# Altium footprint library Terminal_Blocks_Pluggable PCB_5.08mm.PcbLib: 299 footprints (part 5 of 19)
Each footprint in its own frame and in the unit in brackets; x right, y up, seen from the top. Pads: shape width x height; smd on the part's side, far side on the other; paste and mask are expansions set on the pad; w line width, h text height; cw(c..) or ccw(c..) is an arc to the next point about the centre after c.
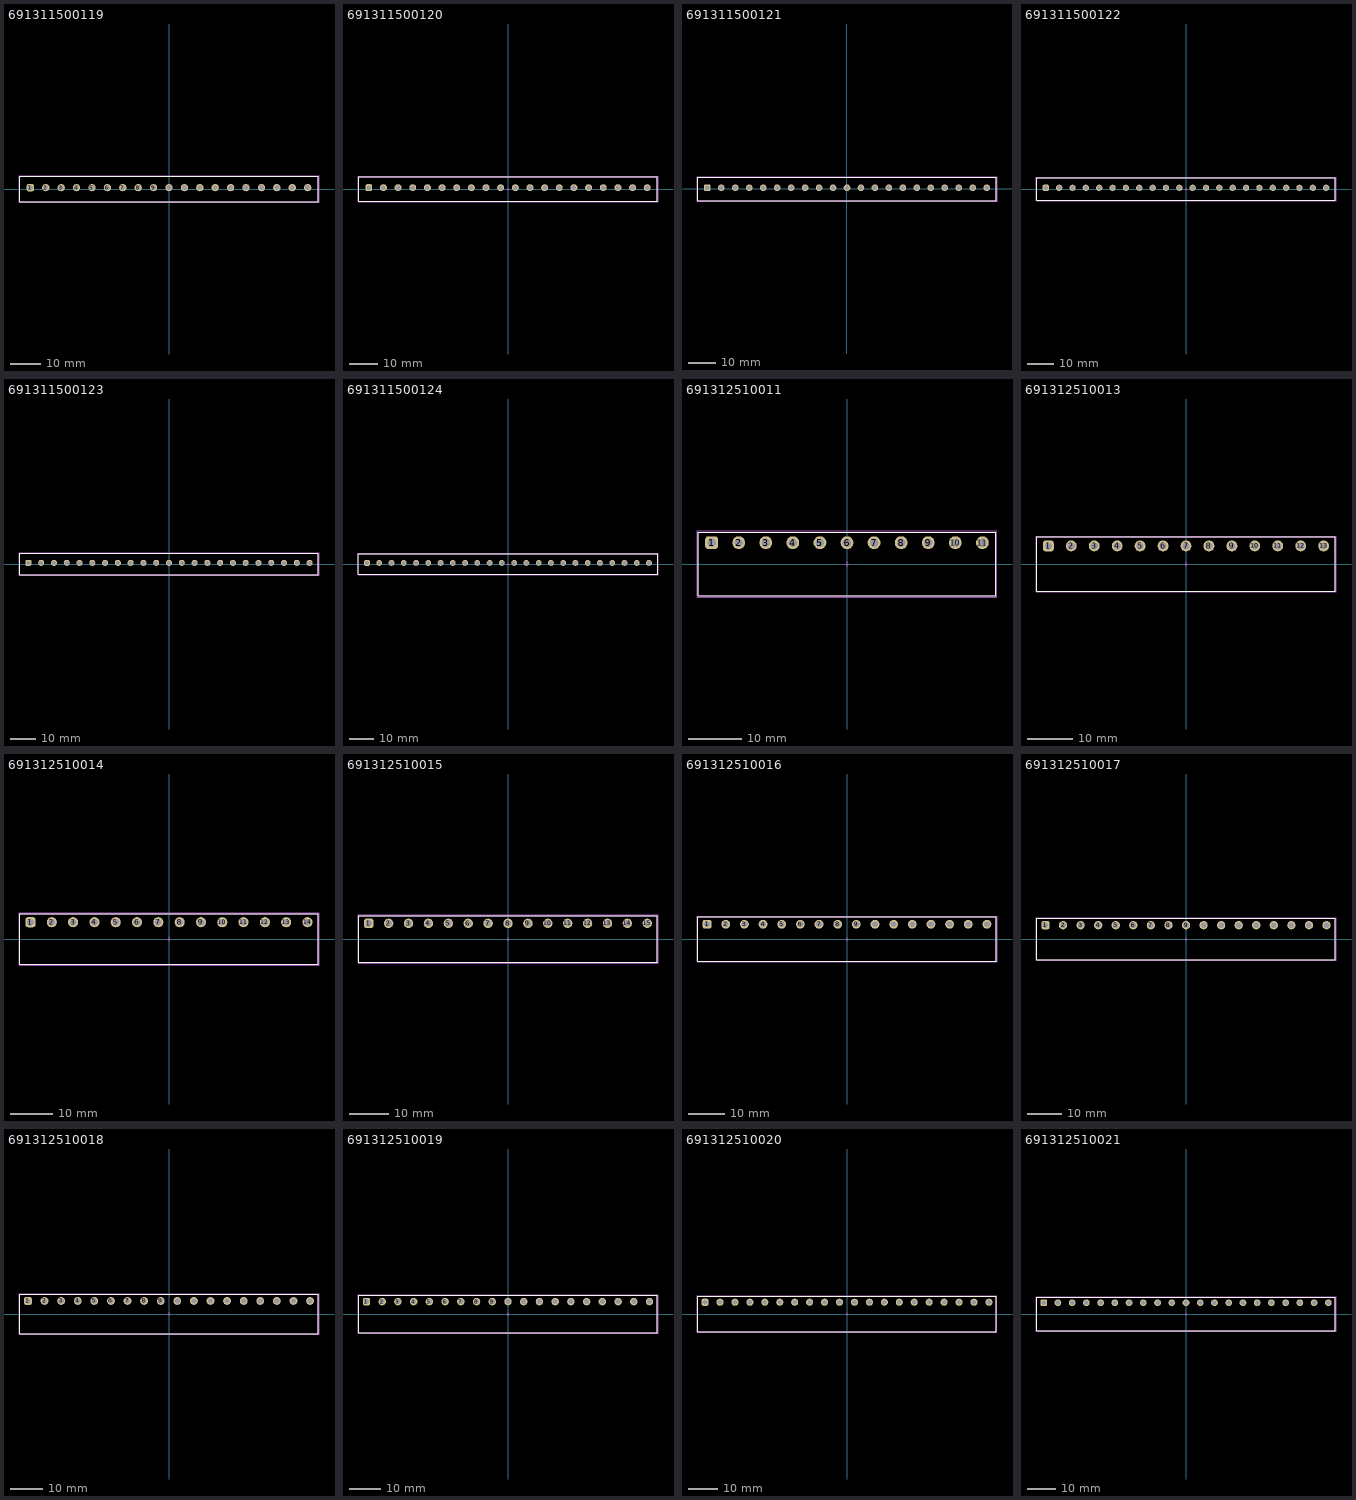
[diagram p4: the footprints below, top view; thin cyan lines are the x and y axes]

## 691311500119 [mm] "5,08mm - PCB Headers - Vertical - Closed ends -19p"
height 12
pads (19):
  rrect50% 2.4x2.4 hole 1.6: 1(-45.72,0.45)
  round 2.4 hole 1.6: 2(-40.64,0.45) 3(-35.56,0.45) 4(-30.48,0.45) 5(-25.4,0.45) 6(-20.32,0.45) 7(-15.24,0.45) 8(-10.16,0.45) 9(-5.08,0.45) 10(0,0.45) 11(5.08,0.45) 12(10.16,0.45) 13(15.24,0.45) 14(20.32,0.45) 15(25.4,0.45) 16(30.48,0.45) 17(35.56,0.45) 18(40.64,0.45) 19(45.72,0.45)
Top Overlay:
  lines w0.2: -49.26,-4.25 49.26,-4.25 49.26,4.25 -49.26,4.25 -49.26,-4.25
Top Designator:
  text ".Designator" at -7.498,-0.5 h1.5
Top Component Outline:
  lines w0.1: -49.26,-4.25 -49.26,4.25 49.26,4.25 49.26,-4.25 -49.26,-4.25
Top 3D Body:
  lines w0.1: -49.26,-4.25 49.26,-4.25 49.26,4.25 -49.26,4.25 -49.26,-4.25
Top Courtyard:
  lines w0.05: -49.46,-4.45 49.46,-4.45 49.46,4.45 -49.46,4.45 -49.46,-4.45
Top Component Center:
  lines w0.05: -0.5,0 0.5,0 ; 0,-0.5 0,0.5
3D body "691311500119.stp": height 12.05, standoff -3.95, extent -49.26,-4.25 49.26,4.25

## 691311500120 [mm] "5,08mm - PCB Headers - Vertical - Closed ends -20p"
height 12
pads (20):
  rrect50% 2.4x2.4 hole 1.6: 1(-48.26,0.45)
  round 2.4 hole 1.6: 2(-43.18,0.45) 3(-38.1,0.45) 4(-33.02,0.45) 5(-27.94,0.45) 6(-22.86,0.45) 7(-17.78,0.45) 8(-12.7,0.45) 9(-7.62,0.45) 10(-2.54,0.45) 11(2.54,0.45) 12(7.62,0.45) 13(12.7,0.45) 14(17.78,0.45) 15(22.86,0.45) 16(27.94,0.45) 17(33.02,0.45) 18(38.1,0.45) 19(43.18,0.45) 20(48.26,0.45)
Top Overlay:
  lines w0.2: -51.8,-4.25 -51.8,4.25 51.8,4.25 51.8,-4.25 -51.8,-4.25
Top Designator:
  text ".Designator" at -7.498,-0.5 h1.5
Top Component Outline:
  lines w0.1: -51.8,-4.25 51.8,-4.25 51.8,4.25 -51.8,4.25 -51.8,-4.25
Top 3D Body:
  lines w0.1: -51.8,-4.25 -51.8,4.25 51.8,4.25 51.8,-4.25 -51.8,-4.25
Top Courtyard:
  lines w0.05: -52,-4.45 -52,4.45 52,4.45 52,-4.45 -52,-4.45
Top Component Center:
  lines w0.05: -0.5,0 0.5,0 ; 0,-0.5 0,0.5
3D body "691311500120.stp": height 12.05, standoff -3.95, extent -51.8,-4.25 51.8,4.25

## 691311500121 [mm] "5,08mm - PCB Headers - Vertical - Closed ends -21p"
height 12
pads (21):
  rrect50% 2.4x2.4 hole 1.6: 1(-50.8,0.45)
  round 2.4 hole 1.6: 2(-45.72,0.45) 3(-40.64,0.45) 4(-35.56,0.45) 5(-30.48,0.45) 6(-25.4,0.45) 7(-20.32,0.45) 8(-15.24,0.45) 9(-10.16,0.45) 10(-5.08,0.45) 11(0,0.45) 12(5.08,0.45) 13(10.16,0.45) 14(15.24,0.45) 15(20.32,0.45) 16(25.4,0.45) 17(30.48,0.45) 18(35.56,0.45) 19(40.64,0.45) 20(45.72,0.45) 21(50.8,0.45)
Top Overlay:
  lines w0.2: -54.34,-4.25 54.34,-4.25 54.34,4.25 -54.34,4.25 -54.34,-4.25
Top Designator:
  text ".Designator" at -7.498,-0.5 h1.5
Top Component Outline:
  lines w0.1: -54.34,-4.25 -54.34,4.25 54.34,4.25 54.34,-4.25 -54.34,-4.25
Top 3D Body:
  lines w0.1: -54.34,-4.25 54.34,-4.25 54.34,4.25 -54.34,4.25 -54.34,-4.25
Top Courtyard:
  lines w0.05: -54.54,-4.45 54.54,-4.45 54.54,4.45 -54.54,4.45 -54.54,-4.45
Top Component Center:
  lines w0.05: -0.5,0 0.5,0 ; 0,-0.5 0,0.5
3D body "691311500121.stp": height 12.05, standoff -3.95, extent -54.34,-4.25 54.34,4.25

## 691311500122 [mm] "5,08mm - PCB Headers - Vertical - Closed ends -22p"
height 12
pads (22):
  rrect50% 2.4x2.4 hole 1.6: 1(-53.34,0.45)
  round 2.4 hole 1.6: 2(-48.26,0.45) 3(-43.18,0.45) 4(-38.1,0.45) 5(-33.02,0.45) 6(-27.94,0.45) 7(-22.86,0.45) 8(-17.78,0.45) 9(-12.7,0.45) 10(-7.62,0.45) 11(-2.54,0.45) 12(2.54,0.45) 13(7.62,0.45) 14(12.7,0.45) 15(17.78,0.45) 16(22.86,0.45) 17(27.94,0.45) 18(33.02,0.45) 19(38.1,0.45) 20(43.18,0.45) 21(48.26,0.45) 22(53.34,0.45)
Top Overlay:
  lines w0.2: -56.88,-4.25 56.88,-4.25 56.88,4.25 -56.88,4.25 -56.88,-4.25
Top Designator:
  text ".Designator" at -7.498,-0.5 h1.5
Top Component Outline:
  lines w0.1: -56.88,-4.25 -56.88,4.25 56.88,4.25 56.88,-4.25 -56.88,-4.25
Top 3D Body:
  lines w0.1: -56.88,-4.25 56.88,-4.25 56.88,4.25 -56.88,4.25 -56.88,-4.25
Top Courtyard:
  lines w0.05: -57.08,-4.45 57.08,-4.45 57.08,4.45 -57.08,4.45 -57.08,-4.45
Top Component Center:
  lines w0.05: -0.5,0 0.5,0 ; 0,-0.5 0,0.5
3D body "691311500122.stp": height 12.05, standoff -3.95, extent -56.88,-4.25 56.88,4.25

## 691311500123 [mm] "5,08mm - PCB Headers - Vertical - Closed ends -23p"
height 12
pads (23):
  rrect50% 2.4x2.4 hole 1.6: 1(-55.88,0.45)
  round 2.4 hole 1.6: 2(-50.8,0.45) 3(-45.72,0.45) 4(-40.64,0.45) 5(-35.56,0.45) 6(-30.48,0.45) 7(-25.4,0.45) 8(-20.32,0.45) 9(-15.24,0.45) 10(-10.16,0.45) 11(-5.08,0.45) 12(0,0.45) 13(5.08,0.45) 14(10.16,0.45) 15(15.24,0.45) 16(20.32,0.45) 17(25.4,0.45) 18(30.48,0.45) 19(35.56,0.45) 20(40.64,0.45) 21(45.72,0.45) 22(50.8,0.45) 23(55.88,0.45)
Top Overlay:
  lines w0.2: -59.42,-4.25 -59.42,4.25 59.42,4.25 59.42,-4.25 -59.42,-4.25
Top Designator:
  text ".Designator" at -7.498,-0.5 h1.5
Top Component Outline:
  lines w0.1: -59.42,-4.25 59.42,-4.25 59.42,4.25 -59.42,4.25 -59.42,-4.25
Top 3D Body:
  lines w0.1: -59.42,-4.25 -59.42,4.25 59.42,4.25 59.42,-4.25 -59.42,-4.25
Top Courtyard:
  lines w0.05: -59.62,-4.45 -59.62,4.45 59.62,4.45 59.62,-4.45 -59.62,-4.45
Top Component Center:
  lines w0.05: -0.5,0 0.5,0 ; 0,-0.5 0,0.5
3D body "691311500123.stp": height 12.05, standoff -3.95, extent -59.42,-4.25 59.42,4.25

## 691311500124 [mm] "5,08mm - PCB Headers - Vertical - Closed ends -24p"
height 12
pads (24):
  rrect50% 2.4x2.4 hole 1.6: 1(-58.42,0.45)
  round 2.4 hole 1.6: 2(-53.34,0.45) 3(-48.26,0.45) 4(-43.18,0.45) 5(-38.1,0.45) 6(-33.02,0.45) 7(-27.94,0.45) 8(-22.86,0.45) 9(-17.78,0.45) 10(-12.7,0.45) 11(-7.62,0.45) 12(-2.54,0.45) 13(2.54,0.45) 14(7.62,0.45) 15(12.7,0.45) 16(17.78,0.45) 17(22.86,0.45) 18(27.94,0.45) 19(33.02,0.45) 20(38.1,0.45) 21(43.18,0.45) 22(48.26,0.45) 23(53.34,0.45) 24(58.42,0.45)
Top Overlay:
  lines w0.2: -61.96,-4.25 61.96,-4.25 61.96,4.25 -61.96,4.25 -61.96,-4.25
Top Designator:
  text ".Designator" at -7.498,-0.5 h1.5
Top Component Outline:
  lines w0.1: -61.96,-4.25 -61.96,4.25 61.96,4.25 61.96,-4.25 -61.96,-4.25
Top 3D Body:
  lines w0.1: -61.96,-4.25 61.96,-4.25 61.96,4.25 -61.96,4.25 -61.96,-4.25
Top Courtyard:
  lines w0.05: -62.16,-4.45 62.16,-4.45 62.16,4.45 -62.16,4.45 -62.16,-4.45
Top Component Center:
  lines w0.05: -0.5,0 0.5,0 ; 0,-0.5 0,0.5
3D body "691311500124.stp": height 12.05, standoff -3.95, extent -61.96,-4.25 61.96,4.25

## 691312510011 [mm] "5,08mm - PCB Headers - Horizontal - Opened ends - 11p"
height 8.5
pads (11):
  rrect50% 2.4x2.4 hole 1.6: 1(-25.4,4)
  round 2.4 hole 1.6: 2(-20.32,4) 3(-15.24,4) 4(-10.16,4) 5(-5.08,4) 6(0,4) 7(5.08,4) 8(10.16,4) 9(15.24,4) 10(20.32,4) 11(25.4,4)
Top Overlay:
  lines w0.2: -27.94,-6 27.94,-6 27.94,6 -27.94,6 -27.94,-6
Top Designator:
  text ".Designator" at -7.498,-0.5 h1.5
Top Component Outline:
  lines w0.1: -27.94,-6 -27.94,6 27.94,6 27.94,-6 -27.94,-6
Top 3D Body:
  lines w0.1: -27.94,-6 27.94,-6 27.94,6 -27.94,6 -27.94,-6
Top Courtyard:
  lines w0.05: -28.14,-6.2 28.14,-6.2 28.14,6.2 -28.14,6.2 -28.14,-6.2
Top Component Center:
  lines w0.05: -0.5,0 0.5,0 ; 0,-0.5 0,0.5
3D body "691312510011.stp": height 8.55, standoff -3.45, extent -27.94,-6 27.94,6

## 691312510013 [mm] "5,08mm - PCB Headers - Horizontal - Opened ends - 13p"
height 8.5
pads (13):
  rrect50% 2.4x2.4 hole 1.6: 1(-30.48,4)
  round 2.4 hole 1.6: 2(-25.4,4) 3(-20.32,4) 4(-15.24,4) 5(-10.16,4) 6(-5.08,4) 7(0,4) 8(5.08,4) 9(10.16,4) 10(15.24,4) 11(20.32,4) 12(25.4,4) 13(30.48,4)
Top Overlay:
  lines w0.2: -33.02,-6 -33.02,6 33.02,6 33.02,-6 -33.02,-6
Top Designator:
  text ".Designator" at -7.498,-0.5 h1.5
Top Component Outline:
  lines w0.1: -33.02,-6 33.02,-6 33.02,6 -33.02,6 -33.02,-6
Top 3D Body:
  lines w0.1: -33.02,-6 -33.02,6 33.02,6 33.02,-6 -33.02,-6
Top Courtyard:
  lines w0.05: -33.22,-6.2 -33.22,6.2 33.22,6.2 33.22,-6.2 -33.22,-6.2
Top Component Center:
  lines w0.05: -0.5,0 0.5,0 ; 0,-0.5 0,0.5
3D body "691312510013.stp": height 8.55, standoff -3.45, extent -33.02,-6 33.02,6

## 691312510014 [mm] "5,08mm - PCB Headers - Horizontal - Opened ends - 14p"
height 8.5
pads (14):
  rrect50% 2.4x2.4 hole 1.6: 1(-33.02,4)
  round 2.4 hole 1.6: 2(-27.94,4) 3(-22.86,4) 4(-17.78,4) 5(-12.7,4) 6(-7.62,4) 7(-2.54,4) 8(2.54,4) 9(7.62,4) 10(12.7,4) 11(17.78,4) 12(22.86,4) 13(27.94,4) 14(33.02,4)
Top Overlay:
  lines w0.2: -35.56,-6 35.56,-6 35.56,6 -35.56,6 -35.56,-6
Top Designator:
  text ".Designator" at -7.498,-0.5 h1.5
Top Component Outline:
  lines w0.1: -35.56,-6 -35.56,6 35.56,6 35.56,-6 -35.56,-6
Top 3D Body:
  lines w0.1: -35.56,-6 35.56,-6 35.56,6 -35.56,6 -35.56,-6
Top Courtyard:
  lines w0.05: -35.76,-6.2 35.76,-6.2 35.76,6.2 -35.76,6.2 -35.76,-6.2
Top Component Center:
  lines w0.05: -0.5,0 0.5,0 ; 0,-0.5 0,0.5
3D body "691312510014.stp": height 8.55, standoff -3.45, extent -35.56,-6 35.56,6

## 691312510015 [mm] "5,08mm - PCB Headers - Horizontal - Opened ends - 15p"
height 8.5
pads (15):
  rrect50% 2.4x2.4 hole 1.6: 1(-35.56,4)
  round 2.4 hole 1.6: 2(-30.48,4) 3(-25.4,4) 4(-20.32,4) 5(-15.24,4) 6(-10.16,4) 7(-5.08,4) 8(0,4) 9(5.08,4) 10(10.16,4) 11(15.24,4) 12(20.32,4) 13(25.4,4) 14(30.48,4) 15(35.56,4)
Top Overlay:
  lines w0.2: -38.1,-6 -38.1,6 38.1,6 38.1,-6 -38.1,-6
Top Designator:
  text ".Designator" at -7.498,-0.5 h1.5
Top Component Outline:
  lines w0.1: -38.1,-6 38.1,-6 38.1,6 -38.1,6 -38.1,-6
Top 3D Body:
  lines w0.1: -38.1,-6 -38.1,6 38.1,6 38.1,-6 -38.1,-6
Top Courtyard:
  lines w0.05: -38.3,-6.2 -38.3,6.2 38.3,6.2 38.3,-6.2 -38.3,-6.2
Top Component Center:
  lines w0.05: -0.5,0 0.5,0 ; 0,-0.5 0,0.5
3D body "691312510015.stp": height 8.55, standoff -3.45, extent -38.1,-6 38.1,6

## 691312510016 [mm] "5,08mm - PCB Headers - Horizontal - Opened ends - 16p"
height 8.5
pads (16):
  rrect50% 2.4x2.4 hole 1.6: 1(-38.1,4)
  round 2.4 hole 1.6: 2(-33.02,4) 3(-27.94,4) 4(-22.86,4) 5(-17.78,4) 6(-12.7,4) 7(-7.62,4) 8(-2.54,4) 9(2.54,4) 10(7.62,4) 11(12.7,4) 12(17.78,4) 13(22.86,4) 14(27.94,4) 15(33.02,4) 16(38.1,4)
Top Overlay:
  lines w0.2: -40.64,-6 -40.64,6 40.64,6 40.64,-6 -40.64,-6
Top Designator:
  text ".Designator" at -7.498,-0.5 h1.5
Top Component Outline:
  lines w0.1: -40.64,-6 40.64,-6 40.64,6 -40.64,6 -40.64,-6
Top 3D Body:
  lines w0.1: -40.64,-6 -40.64,6 40.64,6 40.64,-6 -40.64,-6
Top Courtyard:
  lines w0.05: -40.84,-6.2 -40.84,6.2 40.84,6.2 40.84,-6.2 -40.84,-6.2
Top Component Center:
  lines w0.05: -0.5,0 0.5,0 ; 0,-0.5 0,0.5
3D body "691312510016.stp": height 8.55, standoff -3.45, extent -40.64,-6 40.64,6

## 691312510017 [mm] "5,08mm - PCB Headers - Horizontal - Opened ends - 17p"
height 8.5
pads (17):
  rrect50% 2.4x2.4 hole 1.6: 1(-40.64,4)
  round 2.4 hole 1.6: 2(-35.56,4) 3(-30.48,4) 4(-25.4,4) 5(-20.32,4) 6(-15.24,4) 7(-10.16,4) 8(-5.08,4) 9(0,4) 10(5.08,4) 11(10.16,4) 12(15.24,4) 13(20.32,4) 14(25.4,4) 15(30.48,4) 16(35.56,4) 17(40.64,4)
Top Overlay:
  lines w0.2: -43.18,-6 43.18,-6 43.18,6 -43.18,6 -43.18,-6
Top Designator:
  text ".Designator" at -7.498,-0.5 h1.5
Top Component Outline:
  lines w0.1: -43.18,-6 -43.18,6 43.18,6 43.18,-6 -43.18,-6
Top 3D Body:
  lines w0.1: -43.18,-6 43.18,-6 43.18,6 -43.18,6 -43.18,-6
Top Courtyard:
  lines w0.05: -43.38,-6.2 43.38,-6.2 43.38,6.2 -43.38,6.2 -43.38,-6.2
Top Component Center:
  lines w0.05: -0.5,0 0.5,0 ; 0,-0.5 0,0.5
3D body "691312510017.stp": height 8.55, standoff -3.45, extent -43.18,-6 43.18,6

## 691312510018 [mm] "5,08mm - PCB Headers - Horizontal - Opened ends - 18p"
height 8.5
pads (18):
  rrect50% 2.4x2.4 hole 1.6: 1(-43.18,4)
  round 2.4 hole 1.6: 2(-38.1,4) 3(-33.02,4) 4(-27.94,4) 5(-22.86,4) 6(-17.78,4) 7(-12.7,4) 8(-7.62,4) 9(-2.54,4) 10(2.54,4) 11(7.62,4) 12(12.7,4) 13(17.78,4) 14(22.86,4) 15(27.94,4) 16(33.02,4) 17(38.1,4) 18(43.18,4)
Top Overlay:
  lines w0.2: -45.72,-6 -45.72,6 45.72,6 45.72,-6 -45.72,-6
Top Designator:
  text ".Designator" at -7.498,-0.5 h1.5
Top Component Outline:
  lines w0.1: -45.72,-6 45.72,-6 45.72,6 -45.72,6 -45.72,-6
Top 3D Body:
  lines w0.1: -45.72,-6 -45.72,6 45.72,6 45.72,-6 -45.72,-6
Top Courtyard:
  lines w0.05: -45.92,-6.2 -45.92,6.2 45.92,6.2 45.92,-6.2 -45.92,-6.2
Top Component Center:
  lines w0.05: -0.5,0 0.5,0 ; 0,-0.5 0,0.5
3D body "691312510018.stp": height 8.55, standoff -3.45, extent -45.72,-6 45.72,6

## 691312510019 [mm] "5,08mm - PCB Headers - Horizontal - Opened ends - 19p"
height 8.5
pads (19):
  rrect50% 2.4x2.4 hole 1.6: 1(-45.72,4)
  round 2.4 hole 1.6: 2(-40.64,4) 3(-35.56,4) 4(-30.48,4) 5(-25.4,4) 6(-20.32,4) 7(-15.24,4) 8(-10.16,4) 9(-5.08,4) 10(0,4) 11(5.08,4) 12(10.16,4) 13(15.24,4) 14(20.32,4) 15(25.4,4) 16(30.48,4) 17(35.56,4) 18(40.64,4) 19(45.72,4)
Top Overlay:
  lines w0.2: -48.26,-6 -48.26,6 48.26,6 48.26,-6 -48.26,-6
Top Designator:
  text ".Designator" at -7.498,-0.5 h1.5
Top Component Outline:
  lines w0.1: -48.26,-6 48.26,-6 48.26,6 -48.26,6 -48.26,-6
Top 3D Body:
  lines w0.1: -48.26,-6 -48.26,6 48.26,6 48.26,-6 -48.26,-6
Top Courtyard:
  lines w0.05: -48.46,-6.2 -48.46,6.2 48.46,6.2 48.46,-6.2 -48.46,-6.2
Top Component Center:
  lines w0.05: -0.5,0 0.5,0 ; 0,-0.5 0,0.5
3D body "691312510019.stp": height 8.55, standoff -3.45, extent -48.26,-6 48.26,6

## 691312510020 [mm] "5,08mm - PCB Headers - Horizontal - Opened ends - 20p"
height 8.5
pads (20):
  rrect50% 2.4x2.4 hole 1.6: 1(-48.26,4)
  round 2.4 hole 1.6: 2(-43.18,4) 3(-38.1,4) 4(-33.02,4) 5(-27.94,4) 6(-22.86,4) 7(-17.78,4) 8(-12.7,4) 9(-7.62,4) 10(-2.54,4) 11(2.54,4) 12(7.62,4) 13(12.7,4) 14(17.78,4) 15(22.86,4) 16(27.94,4) 17(33.02,4) 18(38.1,4) 19(43.18,4) 20(48.26,4)
Top Overlay:
  lines w0.2: -50.8,-6 50.8,-6 50.8,6 -50.8,6 -50.8,-6
Top Designator:
  text ".Designator" at -7.498,-0.5 h1.5
Top Component Outline:
  lines w0.1: -50.8,-6 -50.8,6 50.8,6 50.8,-6 -50.8,-6
Top 3D Body:
  lines w0.1: -50.8,-6 50.8,-6 50.8,6 -50.8,6 -50.8,-6
Top Courtyard:
  lines w0.05: -51,-6.2 51,-6.2 51,6.2 -51,6.2 -51,-6.2
Top Component Center:
  lines w0.05: -0.5,0 0.5,0 ; 0,-0.5 0,0.5
3D body "691312510020.stp": height 8.55, standoff -3.45, extent -50.8,-6 50.8,6

## 691312510021 [mm] "5,08mm - PCB Headers - Horizontal - Opened ends - 21p"
height 8.5
pads (21):
  rrect50% 2.4x2.4 hole 1.6: 1(-50.8,4)
  round 2.4 hole 1.6: 2(-45.72,4) 3(-40.64,4) 4(-35.56,4) 5(-30.48,4) 6(-25.4,4) 7(-20.32,4) 8(-15.24,4) 9(-10.16,4) 10(-5.08,4) 11(0,4) 12(5.08,4) 13(10.16,4) 14(15.24,4) 15(20.32,4) 16(25.4,4) 17(30.48,4) 18(35.56,4) 19(40.64,4) 20(45.72,4) 21(50.8,4)
Top Overlay:
  lines w0.2: -53.34,-6 -53.34,6 53.34,6 53.34,-6 -53.34,-6
Top Designator:
  text ".Designator" at -7.498,-0.5 h1.5
Top Component Outline:
  lines w0.1: -53.34,-6 53.34,-6 53.34,6 -53.34,6 -53.34,-6
Top 3D Body:
  lines w0.1: -53.34,-6 -53.34,6 53.34,6 53.34,-6 -53.34,-6
Top Courtyard:
  lines w0.05: -53.54,-6.2 -53.54,6.2 53.54,6.2 53.54,-6.2 -53.54,-6.2
Top Component Center:
  lines w0.05: -0.5,0 0.5,0 ; 0,-0.5 0,0.5
3D body "691312510021.stp": height 8.55, standoff -3.45, extent -53.34,-6 53.34,6